# Altium footprint library PWR763A.PcbLib: 36 footprints (part 2 of 3)
Each footprint in its own frame and in the unit in brackets; x right, y up, seen from the top. Pads: shape width x height; smd on the part's side, far side on the other; paste and mask are expansions set on the pad; w line width, h text height; cw(c..) or ccw(c..) is an arc to the next point about the centre after c.
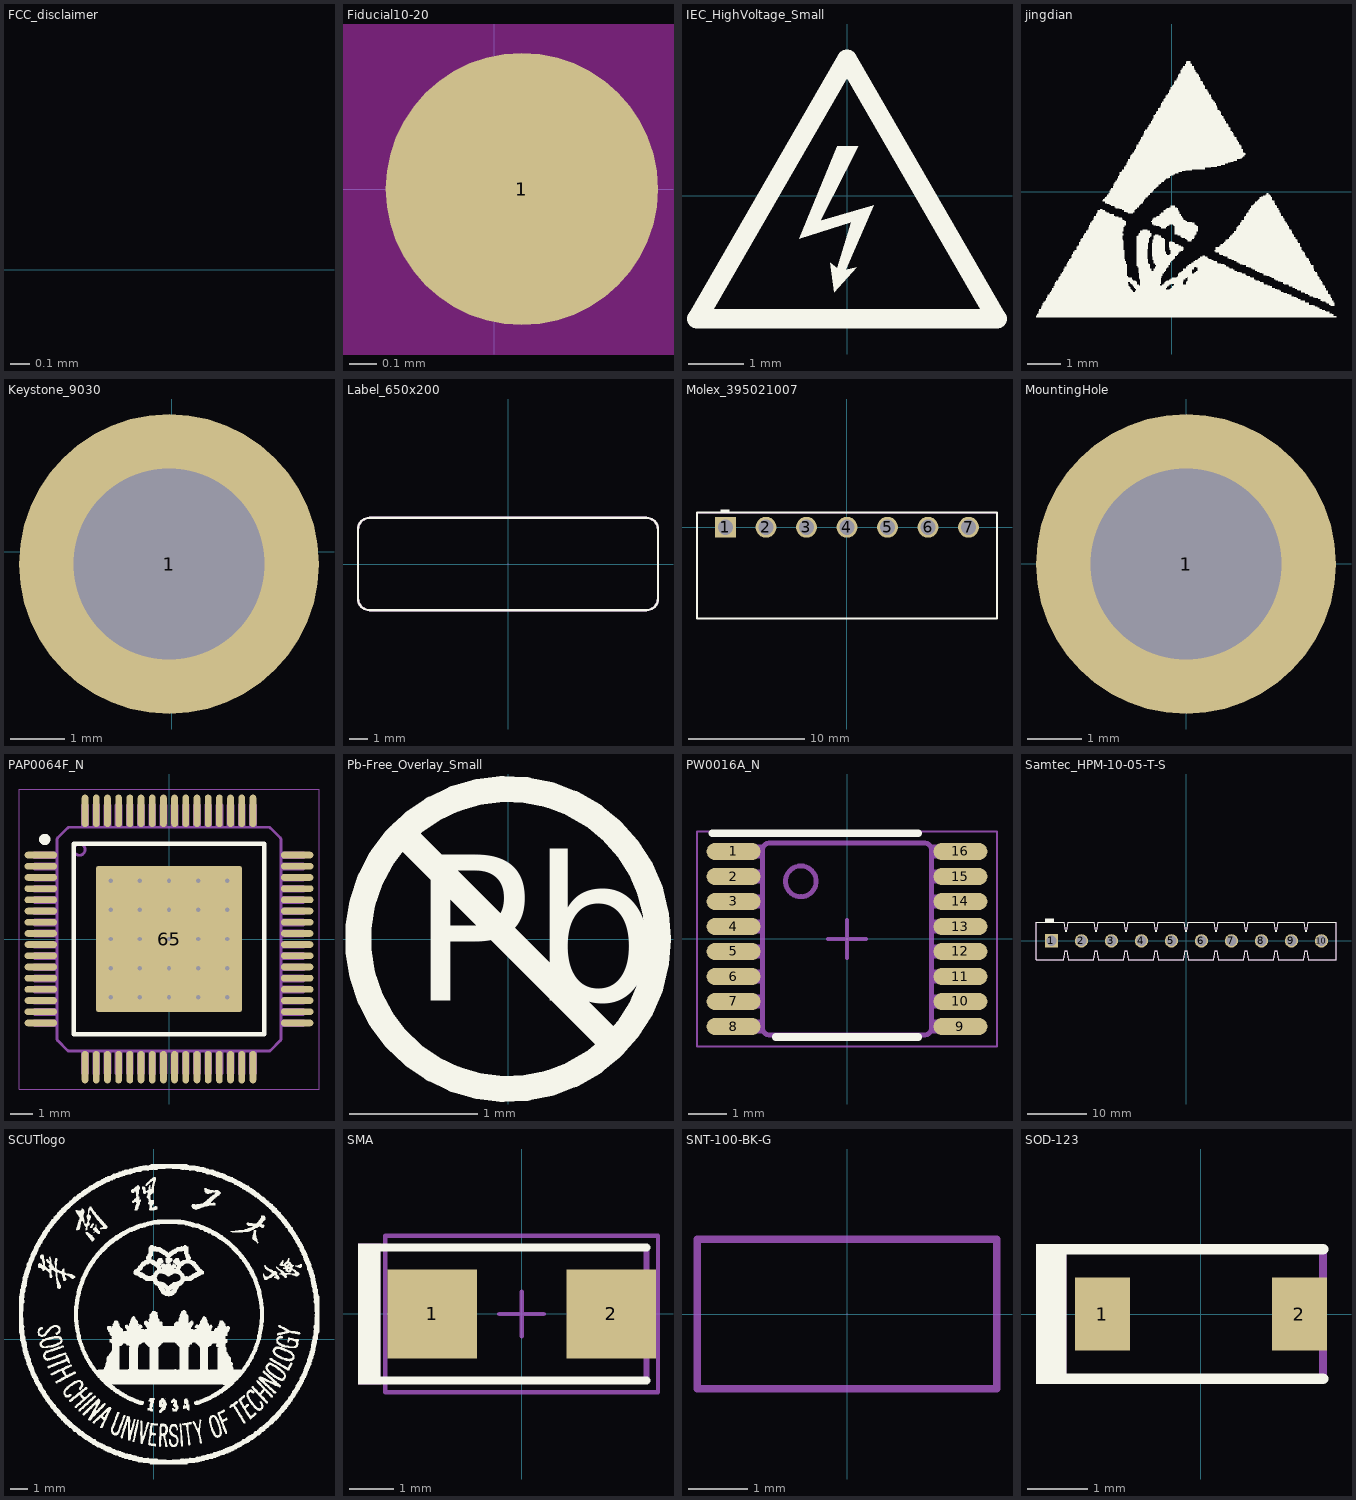
[diagram p1: the footprints below, top view; thin cyan lines are the x and y axes]

## FCC_disclaimer [mm]
Top Overlay:
  text "For evaluation only; not FCC approved for resale." at -15.928,-0.353 h1.52

## Fiducial10-20 [mm]
pads (1):
  round 1 smd: 1(0.102,0)
Top Layer keep-out:
  circle w1.178: c0,0 r0.5

## IEC_HighVoltage_Small [mm]
height 1.35
Top Overlay:
  region: -0.178,0.889 0.203,0.889 -0.483,-0.457 0.483,-0.178 -0.025,-1.346 0.178,-1.295 -0.229,-1.753 -0.305,-1.219 -0.178,-1.321 0.076,-0.483 -0.864,-0.787
  lines w0.356: -2.718,-2.235 2.718,-2.235 0,2.472 -2.718,-2.235

## jingdian [mm]
Top Overlay:
  drawing of 685 lines, arcs and shapes, not listed

## Keystone_9030 [mm] "BRD SPT SNAP LOCK SCREW MNT 3/8\""
height 12.7
pads (1):
  round 5.5 hole 3.5: 1(-0.051,-0.229)

## Label_650x200 [mil] "Thermal Transfer Label"
height 1
pads (1):
  round 1 on Mech13: 0(0,0)
Top Overlay:
  lines w5: -325,-75 ccw(c-300,-75) -300,-100 300,-100 ccw(c300,-75) 325,-75 325,75 ccw(c300,75) 300,100 -300,100 ccw(c-300,75) -325,75 -325,-75
Mechanical 5:
  lines w5: -325,-75 ccw(c-300,-75) -300,-100 300,-100 ccw(c300,-75) 325,-75 325,75 ccw(c300,75) 300,100 -300,100 ccw(c-300,75) -325,75 -325,-75
3D body: height 1, standoff 0, extent -325.51,-100.51 325.51,100.51

## Molex_395021007 [mm] "Header(Shrouded), 3.5mm, 7x1,  R/A, TH"
height 7.2
pads (7):
  rect 1.8x1.8 hole 1.3: 1(-10.5,0)
  round 1.8 hole 1.3: 2(-7,0) 3(-3.5,0) 4(0,0) 5(3.5,0) 6(7,0) 7(10.5,0)
Top Overlay:
  rectangle: -10.922,1.27 -10.16,1.524
  lines w0.2: -12.954,-7.874 12.954,-7.874 12.954,1.27 -12.954,1.27 -12.954,-7.874
Mechanical 5:
  lines w0.1: -12.954,-7.874 -12.954,1.27 12.954,1.27 12.954,-7.874 -12.954,-7.874
3D body: height 6.86, standoff -3.56, extent -12.954,-7.874 12.954,1.27

## MountingHole [mm]
pads (1):
  round 5.5 hole 3.5: 1(0,0)

## PAP0064F_N [mm] "Thin QFP, 64-Leads, Body 10x10mm, Pitch 0.5mm, Thermal Pad 6.5x6.5mm, IPC Medium Density"
height 1.2
pads (65):
  rrect100% 1.45x0.3 smd: 1(-5.725,3.75) 2(-5.725,3.25) 3(-5.725,2.75) 4(-5.725,2.25) 5(-5.725,1.75) 6(-5.725,1.25) 7(-5.725,0.75) 8(-5.725,0.25) 9(-5.725,-0.25) 10(-5.725,-0.75) 11(-5.725,-1.25) 12(-5.725,-1.75) 13(-5.725,-2.25) 14(-5.725,-2.75) 15(-5.725,-3.25) 16(-5.725,-3.75) 33(5.725,-3.75) 34(5.725,-3.25) 35(5.725,-2.75) 36(5.725,-2.25) 37(5.725,-1.75) 38(5.725,-1.25) 39(5.725,-0.75) 40(5.725,-0.25) 41(5.725,0.25) 42(5.725,0.75) 43(5.725,1.25) 44(5.725,1.75) 45(5.725,2.25) 46(5.725,2.75) 47(5.725,3.25) 48(5.725,3.75)
  rrect100% 0.3x1.45 smd: 17(-3.75,-5.725) 18(-3.25,-5.725) 19(-2.75,-5.725) 20(-2.25,-5.725) 21(-1.75,-5.725) 22(-1.25,-5.725) 23(-0.75,-5.725) 24(-0.25,-5.725) 25(0.25,-5.725) 26(0.75,-5.725) 27(1.25,-5.725) 28(1.75,-5.725) 29(2.25,-5.725) 30(2.75,-5.725) 31(3.25,-5.725) 32(3.75,-5.725) 49(3.75,5.725) 50(3.25,5.725) 51(2.75,5.725) 52(2.25,5.725) 53(1.75,5.725) 54(1.25,5.725) 55(0.75,5.725) 56(0.25,5.725) 57(-0.25,5.725) 58(-0.75,5.725) 59(-1.25,5.725) 60(-1.75,5.725) 61(-2.25,5.725) 62(-2.75,5.725) 63(-3.25,5.725) 64(-3.75,5.725)
  rrect2% 6.5x6.5 smd: 65(0,0)
via 0,2.6 diameter 0.5 hole 0.2
via 1.3,2.6 diameter 0.5 hole 0.2
via 2.6,2.6 diameter 0.5 hole 0.2
via -1.3,2.6 diameter 0.5 hole 0.2
via -2.6,2.6 diameter 0.5 hole 0.2
via 0,1.3 diameter 0.5 hole 0.2
via 1.3,1.3 diameter 0.5 hole 0.2
via 2.6,1.3 diameter 0.5 hole 0.2
via -1.3,1.3 diameter 0.5 hole 0.2
via -2.6,1.3 diameter 0.5 hole 0.2
via 0,-2.6 diameter 0.5 hole 0.2
via 1.3,-2.6 diameter 0.5 hole 0.2
via 2.6,-2.6 diameter 0.5 hole 0.2
via -1.3,-2.6 diameter 0.5 hole 0.2
via -2.6,-2.6 diameter 0.5 hole 0.2
via 0,-1.3 diameter 0.5 hole 0.2
via 1.3,-1.3 diameter 0.5 hole 0.2
via 2.6,-1.3 diameter 0.5 hole 0.2
via -1.3,-1.3 diameter 0.5 hole 0.2
via -2.6,-1.3 diameter 0.5 hole 0.2
via -2.6,0 diameter 0.5 hole 0.2
via -1.3,0 diameter 0.5 hole 0.2
via 2.6,0 diameter 0.5 hole 0.2
via 1.3,0 diameter 0.5 hole 0.2
via 0,0 diameter 0.5 hole 0.2
Top Overlay:
  circle w0.25: c-5.55,4.45 r0.125
  lines w0.2: -4.25,-4.25 4.25,-4.25 4.25,4.25 -4.25,4.25 -4.25,-4.25
Mechanical 5:
  drawing of 786 lines, arcs and shapes, not listed
Mechanical 15:
  lines w0.05: -6.7,-6.7 6.7,-6.7 6.7,6.7 -6.7,6.7 -6.7,-6.7
  lines w0.1: -0.5,0 0.5,0 ; 0,-0.5 0,0.5
3D body: height 1.2, standoff 0, extent -6.007,-6.007 6.007,6.007

## Pb-Free_Overlay_Small [mm]
Top Overlay:
  circle w0.203: c0,0 r1.168
  lines w0.203: -0.826,0.826 0.826,-0.826
  text "Pb" at -0.752,-0.48 h1.52

## PW0016A_N [mm] "TSOP, 16-Leads, Body 5x4.4mm, Pitch 0.65mm, IPC Medium Density"
height 1.2
pads (16):
  oval 1.4x0.45 smd: 1(-2.95,2.275) 2(-2.95,1.625) 3(-2.95,0.975) 4(-2.95,0.325) 5(-2.95,-0.325) 6(-2.95,-0.975) 7(-2.95,-1.625) 8(-2.95,-2.275) 9(2.95,-2.275) 10(2.95,-1.625) 11(2.95,-0.975) 12(2.95,-0.325) 13(2.95,0.325) 14(2.95,0.975) 15(2.95,1.625) 16(2.95,2.275)
Top Overlay:
  lines w0.2: -3.5,2.75 1.85,2.75 ; -1.85,-2.55 1.85,-2.55
Mechanical 5:
  drawing of 202 lines, arcs and shapes, not listed
Mechanical 15:
  lines w0.05: -3.9,-2.8 3.9,-2.8 3.9,2.8 -3.9,2.8 -3.9,-2.8
  lines w0.1: -0.5,0 0.5,0 ; 0,-0.5 0,0.5
3D body: height 1, standoff 0, extent -3.21,-2.5 3.21,2.5

## Samtec_HPM-10-05-T-S [mm] "Header, 5.08mm, 10x1, TH"
height 6.61
pads (10):
  rect 2.25x2.25 hole 1.75: 1(-22.86,0)
  round 2.25 hole 1.75: 2(-17.78,0) 3(-12.7,0) 4(-7.62,0) 5(-2.54,0) 6(2.54,0) 7(7.62,0) 8(12.7,0) 9(17.78,0) 10(22.86,0)
Top Overlay:
  rectangle: -23.974,3.2 -22.399,3.8
  lines w0.2: -25.473,-3.175 -20.774,-3.175 -20.559,-1.651 -20.226,-1.651 -20.012,-3.175 -15.694,-3.175 -15.479,-1.651 -15.146,-1.651 -14.932,-3.175 -10.614,-3.175 -10.399,-1.651 -10.066,-1.651 -9.852,-3.175 -5.534,-3.175 -5.319,-1.651 -4.986,-1.651 -4.772,-3.175 -0.454,-3.175 -0.239,-1.651 0.094,-1.651 0.308,-3.175 4.626,-3.175 4.841,-1.651 5.174,-1.651 5.388,-3.175 9.706,-3.175 9.921,-1.651 10.254,-1.651 10.468,-3.175 14.786,-3.175 15.001,-1.651 15.334,-1.651 15.548,-3.175 19.866,-3.175 20.081,-1.651 20.414,-1.651 20.628,-3.175 25.327,-3.175 25.327,3.175 20.628,3.175 20.414,1.651 20.081,1.651 19.866,3.175 15.548,3.175 15.334,1.651 15.001,1.651 14.786,3.175 10.468,3.175 10.254,1.651 9.921,1.651 9.706,3.175 5.388,3.175 5.174,1.651 4.841,1.651 4.626,3.175 0.308,3.175 0.094,1.651 -0.239,1.651 -0.454,3.175 -4.772,3.175 -4.986,1.651 -5.319,1.651 -5.534,3.175 -9.852,3.175 -10.066,1.651 -10.399,1.651 -10.614,3.175 -14.932,3.175 -15.146,1.651 -15.479,1.651 -15.694,3.175 -20.012,3.175 -20.226,1.651 -20.559,1.651 -20.774,3.175 -25.473,3.175 -25.473,-3.175
Mechanical 5:
  lines w0.1: -25.473,-3.175 -25.473,3.175 -20.774,3.175 -20.559,1.651 -20.226,1.651 -20.012,3.175 -15.694,3.175 -15.479,1.651 -15.146,1.651 -14.932,3.175 -10.614,3.175 -10.399,1.651 -10.066,1.651 -9.852,3.175 -5.534,3.175 -5.319,1.651 -4.986,1.651 -4.772,3.175 -0.454,3.175 -0.239,1.651 0.094,1.651 0.308,3.175 4.626,3.175 4.841,1.651 5.174,1.651 5.388,3.175 9.706,3.175 9.921,1.651 10.254,1.651 10.468,3.175 14.786,3.175 15.001,1.651 15.334,1.651 15.548,3.175 19.866,3.175 20.081,1.651 20.414,1.651 20.628,3.175 25.327,3.175 25.327,-3.175 20.628,-3.175 20.414,-1.651 20.081,-1.651 19.866,-3.175 15.548,-3.175 15.334,-1.651 15.001,-1.651 14.786,-3.175 10.468,-3.175 10.254,-1.651 9.921,-1.651 9.706,-3.175 5.388,-3.175 5.174,-1.651 4.841,-1.651 4.626,-3.175 0.308,-3.175 0.094,-1.651 -0.239,-1.651 -0.454,-3.175 -4.772,-3.175 -4.986,-1.651 -5.319,-1.651 -5.534,-3.175 -9.852,-3.175 -10.066,-1.651 -10.399,-1.651 -10.614,-3.175 -14.932,-3.175 -15.146,-1.651 -15.479,-1.651 -15.694,-3.175 -20.012,-3.175 -20.226,-1.651 -20.559,-1.651 -20.774,-3.175 -25.473,-3.175
3D body: height 7.15, standoff -3.77, extent -25.473,-3.175 25.327,3.175

## SCUTlogo [mm]
Top Overlay:
  drawing of 6203 lines, arcs and shapes, not listed

## SMA [mm] "Molded Diode, 2-Leads, Body 4.3x2.6mm, IPC Medium Density, based on OnSemi component dimensions and land pattern"
height 2.27
pads (2):
  rect 2x2 smd: 1(-2,0) 2(2,0)
Top Overlay:
  rectangle: -3.658,-1.575 -3.15,1.575
  lines w0.178: -3.327,-1.486 2.794,-1.486 ; -3.327,1.486 2.794,1.486
Mechanical 5:
  rectangle: -3.658,-1.575 -3.15,1.575
  lines w0.127: -3.327,-1.486 2.794,-1.486 2.794,1.486 -3.327,1.486
Mechanical 15:
  lines w0.1: -0.5,0 0.5,0 ; 0,-0.5 0,0.5 ; -3.05,-1.75 -3.05,1.75 3.05,1.75 3.05,-1.75 -3.05,-1.75
3D body: height 2.42, standoff 0.02, extent -2.6,-1.3 2.6,1.3

## SNT-100-BK-G [mil] "Samtec STEP model"
height 345
pads (1):
  round 1 on Mech3: 0(0,0)
Mechanical 5:
  lines w5: -100,-50 100,-50 100,50 -100,50 -100,-50
3D body: height 344, standoff 104, extent -100,-50.05 100,50.05

## SOD-123 [mm] "On Semi recommended land pattern"
height 1.35
pads (2):
  rect 0.915x1.22 smd: 1(-1.637,0) 2(1.637,0)
Top Overlay:
  rectangle: -2.743,-1.168 -2.235,1.168
  lines w0.178: -2.413,-1.079 2.032,-1.079 ; -2.413,1.079 2.032,1.079
Mechanical 5:
  rectangle: -2.743,-1.168 -2.235,1.168
  lines w0.127: -2.413,-1.079 2.032,-1.079 2.032,1.079 -2.413,1.079
3D body: height 1.35, standoff 0, extent -1.932,-0.9 1.932,0.9